# Altium footprint library PCB_IntegratedCircuit.PcbLib: 62 footprints (part 2 of 4)
Each footprint in its own frame and in the unit in brackets; x right, y up, seen from the top. Pads: shape width x height; smd on the part's side, far side on the other; paste and mask are expansions set on the pad; w line width, h text height; cw(c..) or ccw(c..) is an arc to the next point about the centre after c.
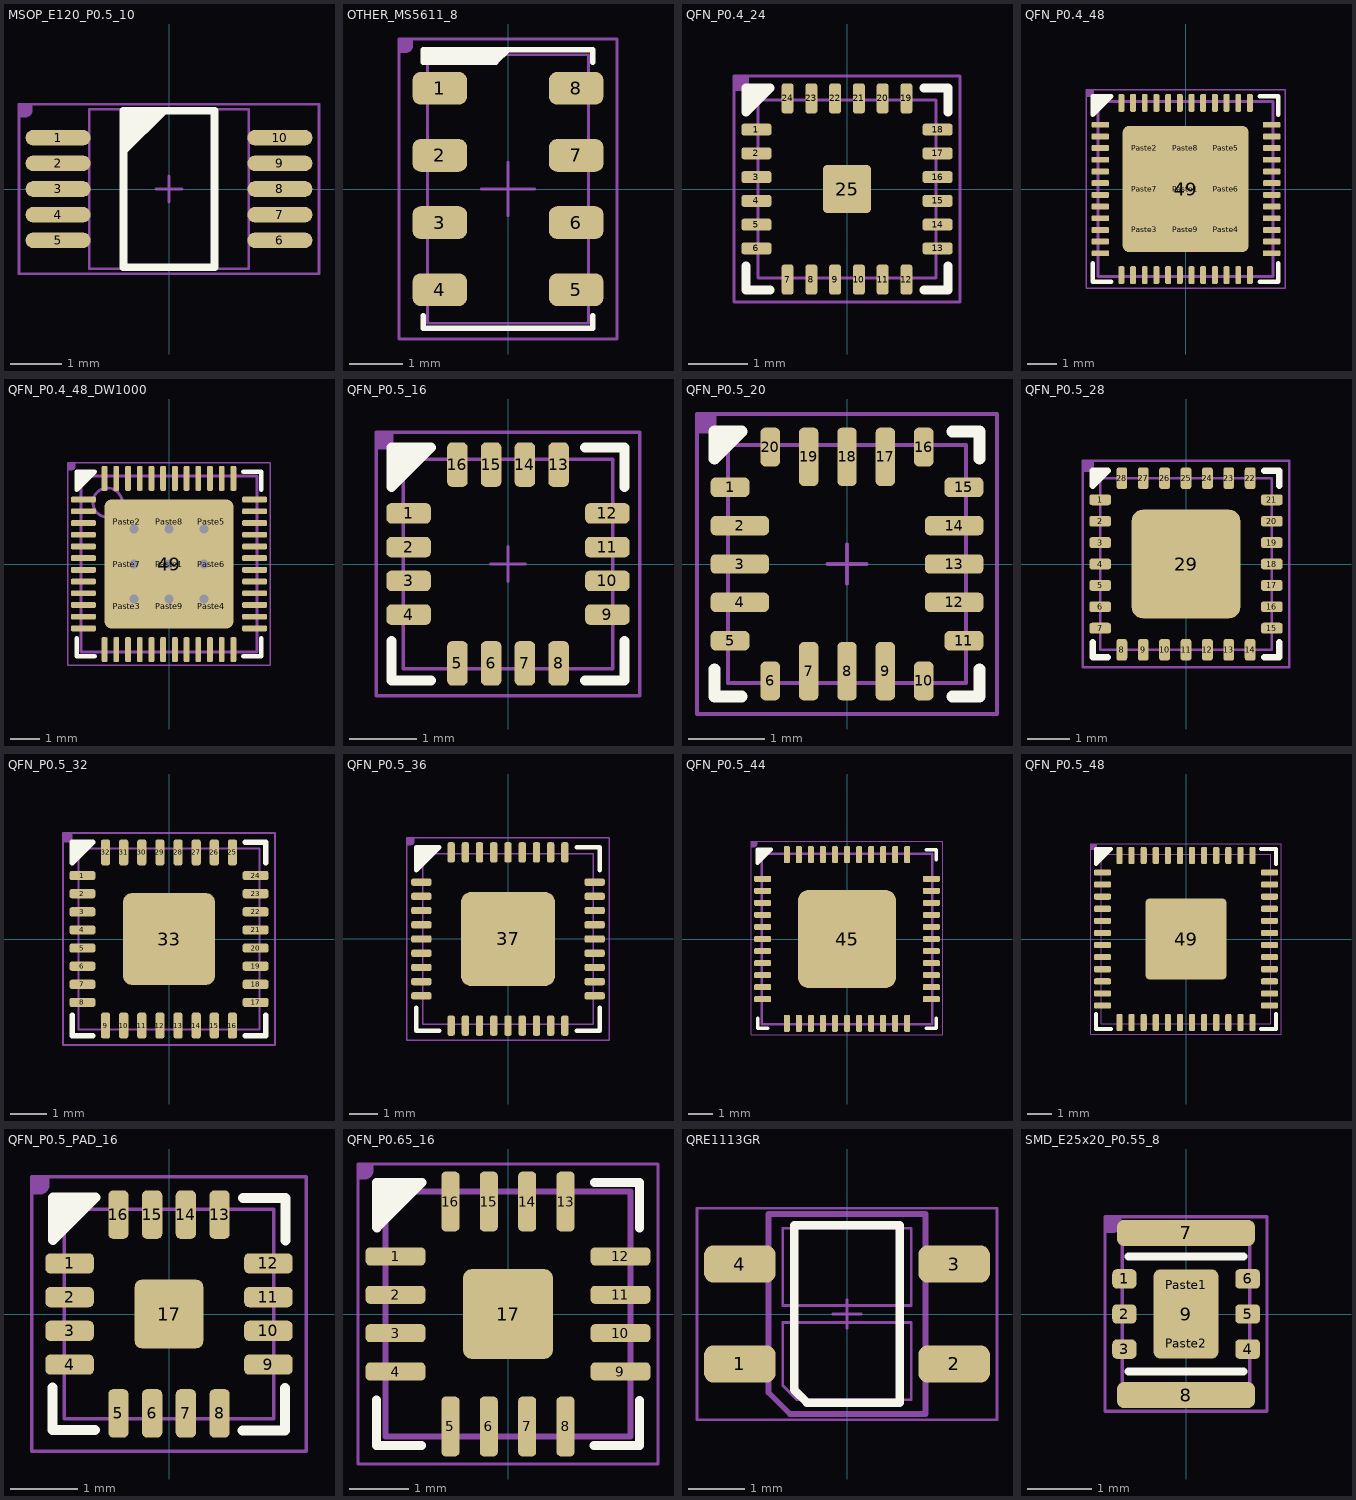
[diagram p1: the footprints below, top view; thin cyan lines are the x and y axes]

## MSOP_E120_P0.5_10 [mil]
height 43.31
pads (10):
  oval 50x12 smd: 1(-85,39.37) 2(-85,19.69) 3(-85,0) 4(-85,-19.68) 5(-85,-39.37) 6(85,-39.37) 7(85,-19.68) 8(85,0) 9(85,19.69) 10(85,39.37)
Top Overlay:
  region: -35,60 0,60 -35,25
  lines w6: -35,-60 -35,60 35,60 35,-60 -35,-60
Mechanical 13:
  lines w2: -10,0 10,0 ; 0,-10 0,10 ; -61.02,-61.02 61.02,-61.02 61.02,61.02 -61.02,61.02 -61.02,-61.02
T-Component:
  region: -115,65 -105,65 -105,60 -105,59.01 -105.76,57.17 -107.17,55.76 -109.01,55 -110,55 -115,55
  lines w2: -115,-65 115,-65 115,65 -115,65 -115,-65
  text ".Designator" at -41,-25 h100
3D body "User Library-msop-10.STEP": height 45.28, standoff 0, extent -96.45,-59.05 96.46,59.06

## OTHER_MS5611_8 [mil]
height 39.37
pads (8):
  rrect50% 40x24 smd: 1(-50,73.82) 2(-50,24.61) 3(-50,-24.61) 4(-50,-73.82) 5(50,-73.82) 6(50,-24.61) 7(50,24.61) 8(50,73.82)
Top Overlay:
  region: -62,102 0,102 -9,93 -62,93
  lines w4: -62,-93 -62,-102 62,-102 62,-93 ; 0,102 -9,93 -62,93 -62,102 62,102 62,93
Mechanical 13:
  lines w2: -19.68,0 19.68,0 ; 0,-19.68 0,19.68 ; -59.06,-98.43 -59.06,98.43 59.06,98.43 59.06,-98.43 -59.06,-98.43
T-Component:
  region: -80,110 -70,110 -70,105 -70,104.01 -70.76,102.17 -72.17,100.76 -74.01,100 -75,100 -80,100
  lines w2: -80,-110 80,-110 80,110 -80,110 -80,-110
  text ".Designator" at -41,-25 h100
3D body "User Library-CRYSTALSMD5X32.STEP": height 39.37, standoff 0, extent -62.99,-98.43 63,98.43

## QFN_P0.4_24 [mil]
height 39.37
pads (25):
  rrect50% 20x8 smd: 1(-60,39.37) 2(-60,23.62) 3(-60,7.87) 4(-60,-7.87) 5(-60,-23.62) 6(-60,-39.37) 13(60,-39.37) 14(60,-23.62) 15(60,-7.87) 16(60,7.87) 17(60,23.62) 18(60,39.37)
  rrect50% 8x20 smd: 7(-39.37,-60) 8(-23.62,-60) 9(-7.87,-60) 10(7.87,-60) 11(23.62,-60) 12(39.37,-60) 19(39.37,60) 20(23.62,60) 21(7.87,60) 22(-7.87,60) 23(-23.62,60) 24(-39.37,60)
  rrect20% 32x32 smd: 25(0,0)
Top Overlay:
  region: -67,67 -51,67 -67,51
  lines w6: -67,-51 -67,-67 -51,-67 ; 51,-67 67,-67 67,-51 ; 51,67 67,67 67,51 ; -67,51 -67,67 -51,67 -67,51
Top Solder:
  rectangle: -39.37,-70 39.37,-50
  region: 50,39.37 50,-39.37 70,-39.37 70,39.37
  rectangle: -39.37,50 39.37,70
  region: -70,39.37 -70,-39.37 -50,-39.37 -50,39.37
Mechanical 13:
  lines w2: -10,0 10,0 ; 0,-10 0,10 ; -59.05,-59.06 59.06,-59.06 59.06,59.06 -59.05,59.06 -59.05,-59.06
T-Component:
  region: -75,75 -65,75 -65,70 -65,69.01 -65.76,67.17 -67.17,65.76 -69.01,65 -70,65 -75,65
  lines w2: -75,-75 -75,75 75,75 75,-75 -75,-75
  text ".Designator" at -41,-25 h100
3D body "QFN40P300X300X100-24L.step": height 39.37, standoff 0, extent -59.84,-59.84 59.85,59.85

## QFN_P0.4_48 [mil]
height 35.43
pads (58):
  rrect50% 24x8 smd: 1(-115,86.61) 2(-115,70.87) 3(-115,55.12) 4(-115,39.37) 5(-115,23.62) 6(-115,7.87) 7(-115,-7.87) 8(-115,-23.62) 9(-115,-39.37) 10(-115,-55.12) 11(-115,-70.87) 12(-115,-86.61) 25(116,-86.61) 26(116,-70.87) 27(116,-55.12) 28(116,-39.37) 29(116,-23.62) 30(116,-7.87) 31(116,7.87) 32(116,23.62) 33(116,39.37) 34(116,55.12) 35(116,70.87) 36(116,86.61)
  rrect50% 8x24 smd: 13(-86.61,-116) 14(-70.87,-116) 15(-55.12,-116) 16(-39.37,-116) 17(-23.62,-116) 18(-7.87,-116) 19(7.87,-116) 20(23.62,-116) 21(39.37,-116) 22(55.12,-116) 23(70.87,-116) 24(86.61,-116) 37(86.61,116) 38(70.87,116) 39(55.12,116) 40(39.37,116) 41(23.62,116) 42(7.87,116) 43(-7.87,116) 44(-23.62,116) 45(-39.37,116) 46(-55.12,116) 47(-70.87,116) 48(-86.61,116)
  rrect10% 170x170 smd paste-173.23 mask+1.97: 49(0,0)
  rrect20% 50x50 on Top Paste mask+1.97: Paste1(0,0) Paste2(-55,55) Paste3(-55,-55) Paste4(55,-55) Paste5(55,55) Paste6(55,0) Paste7(-55,0) Paste8(0,55) Paste9(0,-55)
Top Overlay:
  region: -125,125 -125,100
  region: -125,100 -100,125 -125,125
  lines w6: -125,-100 -125,-125 -100,-125 ; 100,-125 125,-125 125,-100 ; 100,125 125,125 125,100 ; -125,100 -125,125 -100,125 -125,100
Top Solder:
  region: 104,86.61 104,-86.61 128,-86.61 128,86.61
  region: 86.61,-104 -86.61,-104 -86.61,-128 86.61,-128
  region: -103,-86.61 -103,86.61 -127,86.61 -127,-86.61
  rectangle: -86.61,104 86.61,128
Mechanical 13:
  lines w2: -10,0 10,0 ; 0,-10 0,10
  lines w3.94: -118,-118 -118,118 118,118 118,-118 -118,-118
T-Component:
  region: -134,134 -124,134 -124,129 -124,128.01 -124.76,126.17 -126.17,124.76 -128.01,124 -129,124 -134,124
  lines w2: -134,-134 -134,134 134,134 134,-134 -134,-134
  text ".Designator" at -45,-29.91 h100
3D body "QFN40P600X600X90_HS-49N.step": height 35.43, standoff -0.04, extent -118.15,-118.15 118.15,118.15

## QFN_P0.4_48_DW1000 [mm]
height 0.9
pads (58):
  rrect50% 0.85x0.2 smd mask+0.05: 1(-2.925,2.2) 2(-2.925,1.8) 3(-2.925,1.4) 4(-2.925,1) 5(-2.925,0.6) 6(-2.925,0.2) 7(-2.925,-0.2) 8(-2.925,-0.6) 9(-2.925,-1) 10(-2.925,-1.4) 11(-2.925,-1.8) 12(-2.925,-2.2) 25(2.925,-2.2) 26(2.925,-1.8) 27(2.925,-1.4) 28(2.925,-1) 29(2.925,-0.6) 30(2.925,-0.2) 31(2.925,0.2) 32(2.925,0.6) 33(2.925,1) 34(2.925,1.4) 35(2.925,1.8) 36(2.925,2.2)
  rrect50% 0.2x0.85 smd mask+0.05: 13(-2.2,-2.925) 14(-1.8,-2.925) 15(-1.4,-2.925) 16(-1,-2.925) 17(-0.6,-2.925) 18(-0.2,-2.925) 19(0.2,-2.925) 20(0.6,-2.925) 21(1,-2.925) 22(1.4,-2.925) 23(1.8,-2.925) 24(2.2,-2.925) 37(2.2,2.925) 38(1.8,2.925) 39(1.4,2.925) 40(1,2.925) 41(0.6,2.925) 42(0.2,2.925) 43(-0.2,2.925) 44(-0.6,2.925) 45(-1,2.925) 46(-1.4,2.925) 47(-1.8,2.925) 48(-2.2,2.925)
  rrect10% 4.4x4.4 smd paste-4.4 mask+0.05: 49(0,0)
  rrect20% 1.3x1.3 on Top Paste mask+0.05: Paste1(0,0) Paste2(-1.45,1.45) Paste3(-1.45,-1.45) Paste4(1.45,-1.45) Paste5(1.45,1.45) Paste6(1.45,0) Paste7(-1.45,0) Paste8(0,1.45) Paste9(0,-1.45)
via 1.2,0 diameter 0.6 hole 0.3
via 1.2,1.2 diameter 0.6 hole 0.3
via -1.2,1.2 diameter 0.6 hole 0.3
via 1.2,-1.2 diameter 0.6 hole 0.3
via 0,-1.2 diameter 0.6 hole 0.3
via -1.2,-1.2 diameter 0.6 hole 0.3
via -1.2,0 diameter 0.6 hole 0.3
via 0,0 diameter 0.6 hole 0.3
via 0,1.2 diameter 0.6 hole 0.3
Top Overlay:
  region: -3.15,3.15 -2.54,3.15 -3.15,2.54
  lines w0.152: -3.15,-2.54 -3.15,-3.15 -2.54,-3.15 ; 2.54,-3.15 3.15,-3.15 3.15,-2.54 ; 2.54,3.15 3.15,3.15 3.15,2.54 ; -3.15,2.54 -3.15,3.15 -2.54,3.15 -3.15,2.54
Top Solder:
  region: 2.2,-2.5 -2.2,-2.5 -2.2,-3.35 2.2,-3.35
  region: -2.5,-2.2 -2.5,2.2 -3.35,2.2 -3.35,-2.2
  rectangle: -2.2,2.5 2.2,3.35
  region: 2.5,2.2 2.5,-2.2 3.35,-2.2 3.35,2.2
Mechanical 13:
  circle w0.1: c-2.1,2.1 r0.5
  lines w0.051: -0.254,0 0.254,0 ; 0,-0.254 0,0.254
  lines w0.1: -3,-3 3,-3 3,3 -3,3 -3,-3
T-Component:
  region: -3.454,3.454 -3.2,3.454 -3.2,3.327 -3.2,3.302 -3.22,3.255 -3.255,3.22 -3.302,3.2 -3.327,3.2 -3.454,3.2
  lines w0.051: -3.454,-3.454 -3.454,3.454 3.454,3.454 3.454,-3.454 -3.454,-3.454
  text ".Designator" at -1.041,-0.635 h2.54
3D body "QFN40P600X600X90_HS-49L.step": height 0.9, standoff 0, extent -3.001,-3.001 3.001,3.001

## QFN_P0.5_16 [mil]
height 23.62
pads (16):
  rrect50% 26x12 smd: 1(-58,29.53) 2(-58,9.84) 3(-58,-9.84) 4(-58,-29.53) 9(58,-29.53) 10(58,-9.84) 11(58,9.84) 12(58,29.53)
  rrect50% 12x26 smd: 5(-29.53,-58) 6(-9.84,-58) 7(9.84,-58) 8(29.53,-58) 13(29.53,58) 14(9.84,58) 15(-9.84,58) 16(-29.53,58)
Top Overlay:
  region: -68,45 -68,68 -45,68
  lines w6: -68,-45 -68,-68 -45,-68 ; 45,-68 68,-68 68,-45 ; 45,68 68,68 68,45 ; -68,45 -45,68 -68,68 -68,45
Top Solder:
  region: 71,29.53 45,29.53 45,-29.53 71,-29.53
  region: -29.53,71 -29.53,45 29.53,45 29.53,71
  rectangle: -71,-29.53 -45,29.53
  region: 29.53,-71 29.53,-45 -29.53,-45 -29.53,-71
Mechanical 13:
  lines w2: -10,0 10,0 ; 0,-10 0,10 ; -61.02,-61.02 61.02,-61.02 61.02,61.02 -61.02,61.02 -61.02,-61.02
T-Component:
  region: -77,77 -67,77 -67,72 -67,71.01 -67.76,69.17 -69.17,67.76 -71.01,67 -72,67 -77,67
  lines w2: -77,-77 -77,77 77,77 77,-77 -77,-77
  text ".Designator" at -41,-25 h100
3D body "QFN50P300X300X100-16N.step": height 39.37, standoff 0, extent -59.05,-59.05 59.06,59.06

## QFN_P0.5_20 [mil] "QFN, 20-Leads, Body 3.00x3.00mm, Pitch 0.50mm, IPC High Density"
height 23.62
pads (20):
  rrect50% 20x10 smd: 1(-60,39.37) 5(-60,-39.37) 11(60,-39.37) 15(60,39.37)
  rrect50% 30x10 smd: 2(-55,19.69) 3(-55,0) 4(-55,-19.68) 12(55,-19.68) 13(55,0) 14(55,19.69)
  rrect50% 10x20 smd: 6(-39.37,-60) 10(39.37,-60) 16(39.37,60) 20(-39.37,60)
  rrect50% 10x30 smd: 7(-19.69,-55) 8(0,-55) 9(19.68,-55) 17(19.68,55) 18(0,55) 19(-19.69,55)
Top Layer:
  region: -39.37,-60
Top Overlay:
  region: -68,54 -68,68 -54,68
  lines w6: -68,-54 -68,-68 -54,-68 ; 54,-68 68,-68 68,-54 ; 54,68 68,68 68,54 ; -68,54 -54,68 -68,68 -68,54
Top Solder:
  rectangle: -70,-19.68 -40,19.69
  rectangle: 40,-19.68 70,19.69
  region: -19.69,70 -19.69,40 19.69,40 19.69,70
  region: -19.68,-40 -19.69,-70 19.68,-70 19.69,-40
  region: -19.69,-50 -39.37,-50 -39.37,-70 -19.69,-70
  region: -70,-19.69 -70,-39.37 -50,-39.37 -50,-19.68
  region: 19.69,50 39.37,50 39.37,70 19.68,70
  region: 70,19.69 70,39.37 50,39.37 50,19.69
  region: -19.69,70 -39.37,70 -39.37,50 -19.69,50
  region: 19.69,-70 39.37,-70 39.37,-50 19.68,-50
  region: -50,19.69 -50,39.37 -70,39.37 -70,19.69
  region: 50,-19.69 50,-39.37 70,-39.37 70,-19.68
Mechanical 13:
  lines w2: -10,0 10,0 ; 0,-10 0,10 ; -61.02,-61.02 61.02,-61.02 61.02,61.02 -61.02,61.02 -61.02,-61.02
T-Component:
  region: -77,77 -67,77 -67,72 -67,71.01 -67.76,69.17 -69.17,67.76 -71.01,67 -72,67 -77,67
  lines w2: -77,-77 -77,77 77,77 77,-77 -77,-77
  text ".Designator" at -41,-25 h100
3D body "QFN50P300X300X60-20L.step": height 23.62, standoff 0, extent -61.06,-61.06 61.06,61.06

## QFN_P0.5_28 [mil]
height 23.62
pads (29):
  rrect50% 20x10 smd: 1(-79,59.06) 2(-79,39.37) 3(-79,19.68) 4(-79,0) 5(-79,-19.68) 6(-79,-39.37) 7(-79,-59.06) 15(79,-59.06) 16(79,-39.37) 17(79,-19.68) 18(79,0) 19(79,19.68) 20(79,39.37) 21(79,59.06)
  rrect50% 10x20 smd: 8(-59.06,-79) 9(-39.37,-79) 10(-19.68,-79) 11(0,-79) 12(19.68,-79) 13(39.37,-79) 14(59.06,-79) 22(59.06,79) 23(39.37,79) 24(19.68,79) 25(0,79) 26(-19.68,79) 27(-39.37,79)
  rrect50% 9.84x20 smd: 28(-59.06,79)
  rrect20% 100x100 smd: 29(0,0)
Top Overlay:
  region: -86,72 -72,86 -86,86
  lines w6: -86,-72 -86,-86 -72,-86 ; 72,-86 86,-86 86,-72 ; 72,86 86,86 86,72 ; -86,72 -86,86 -72,86 -86,72
Top Solder:
  region: -59.06,89 -59.06,69 59.06,69 59.06,89
  region: 89,59.06 69,59.06 69,-59.05 89,-59.05
  region: 59.06,-89 59.06,-69 -59.06,-69 -59.06,-89
  rectangle: -89,-59.06 -69,59.06
Mechanical 13:
  lines w2: -10,0 10,0 ; 0,-10 0,10 ; -79,-79 79,-79 79,79 -79,79 -79,-79
T-Component:
  region: -95,95 -85,95 -85,90 -85,89.01 -85.76,87.17 -87.17,85.76 -89.01,85 -90,85 -95,85
  lines w2: -95,-95 -95,95 95,95 95,-95 -95,-95
  text ".Designator" at -41,-25 h100
3D body "QFN50P400X400X55-28L.step": height 21.65, standoff 0, extent -78.78,-78.78 78.78,78.78

## QFN_P0.5_32 [mil]
height 39.37
pads (33):
  rrect50% 28x10 smd: 1(-94,68.9) 2(-94,49.21) 3(-94,29.53) 4(-94,9.84) 5(-94,-9.84) 6(-94,-29.53) 7(-94,-49.21) 8(-94,-68.9) 17(94,-68.9) 18(94,-49.21) 19(94,-29.53) 20(94,-9.84) 21(94,9.84) 22(94,29.53) 23(94,49.21) 24(94,68.9)
  rrect50% 10x28 smd: 9(-68.9,-94) 10(-49.21,-94) 11(-29.53,-94) 12(-9.84,-94) 13(9.84,-94) 14(29.53,-94) 15(49.21,-94) 16(68.9,-94) 25(68.9,94) 26(49.21,94) 27(29.53,94) 28(9.84,94) 29(-9.84,94) 30(-29.53,94) 31(-49.21,94) 32(-68.9,94)
  rrect20% 100x100 smd: 33(0,0)
Top Overlay:
  region: -83,105 -105,105 -105,83
  lines w6: -105,-83 -105,-105 -83,-105 ; 83,-105 105,-105 105,-83 ; 83,105 105,105 105,83 ; -105,83 -105,105 -83,105 -105,83
Top Solder:
  region: 68.9,80 68.9,108 -68.9,108 -68.9,80
  region: 68.9,-108 68.9,-80 -68.9,-80 -68.9,-108
  region: -80,68.9 -108,68.9 -108,-68.9 -80,-68.9
  region: 108,68.9 80,68.9 80,-68.9 108,-68.9
Mechanical 13:
  lines w2: -10,0 10,0 ; 0,-10 0,10 ; -98.42,-98.42 -98.42,98.43 98.43,98.43 98.43,-98.42 -98.42,-98.42
T-Component:
  region: -115,115 -105,115 -105,110 -105,109.01 -105.76,107.17 -107.17,105.76 -109.01,105 -110,105 -115,105
  lines w2: -115,-115 -115,115 115,115 115,-115 -115,-115
  text ".Designator" at -41,-25 h100
3D body "QFN50P500X500X55-32L.step": height 21.65, standoff 0, extent -99.21,-99.21 99.22,99.22

## QFN_P0.5_36 [mil]
height 39.37
pads (37):
  rrect50% 28x10 smd: 1(-120,78.74) 2(-120,59.06) 3(-120,39.37) 4(-120,19.69) 5(-120,0) 6(-120,-19.68) 7(-120,-39.37) 8(-120,-59.05) 9(-120,-78.74) 19(120,-78.74) 20(120,-59.05) 21(120,-39.37) 22(120,-19.68) 23(120,0) 24(120,19.68) 25(120,39.37) 26(120,59.06) 27(120,78.74)
  rrect50% 10x28 smd: 10(-78.74,-120) 11(-59.06,-120) 12(-39.37,-120) 13(-19.69,-120) 14(0,-120) 15(19.68,-120) 16(39.37,-120) 17(59.05,-120) 18(78.74,-120) 28(78.74,120) 29(59.05,120) 30(39.37,120) 31(19.68,120) 32(0,120) 33(-19.69,120) 34(-39.37,120) 35(-59.06,120) 36(-78.74,120)
  rrect20% 130x130 smd: 37(0,0)
Top Overlay:
  region: -127,127 -95,127 -127,95
  lines w6: -127,-95 -127,-127 -95,-127 ; 95,-127 127,-127 127,-95 ; 95,127 127,127 127,95 ; -127,95 -127,127 -95,127 -127,95
Top Solder:
  region: 87.74,106 87.74,134 -87.74,134 -87.74,106
  region: 87.74,-134 87.74,-106 -87.74,-106 -87.74,-134
  rectangle: 106,-87.74 134,87.74
  rectangle: -134,-87.74 -106,87.74
Mechanical 13:
  lines w2: -10,0 10,0 ; 0,-10 0,10 ; -118.11,-118.11 118.11,-118.11 118.11,118.11 -118.11,118.11 -118.11,-118.11
T-Component:
  region: -140,140 -130,140 -130,135 -130,134.01 -130.76,132.17 -132.17,130.76 -134.01,130 -135,130 -140,130
  lines w2: -140,-140 -140,140 140,140 140,-140 -140,-140
  text ".Designator" at -41,-25 h100
3D body "QFN50P600X600X90-36L.step": height 35.43, standoff 0, extent -118.89,-118.89 118.9,118.9

## QFN_P0.5_44 [mil]
height 39.37
pads (45):
  rrect50% 28x10 smd: 1(-138,98.43) 2(-138,78.74) 3(-138,59.06) 4(-138,39.37) 5(-138,19.68) 6(-138,0) 7(-138,-19.69) 8(-138,-39.37) 9(-138,-59.06) 10(-138,-78.74) 11(-138,-98.43) 23(138,-98.43) 24(138,-78.74) 25(138,-59.05) 26(138,-39.37) 27(138,-19.68) 28(138,0) 29(138,19.69) 30(138,39.37) 31(138,59.06) 32(138,78.74) 33(138,98.43)
  rrect50% 10x28 smd: 12(-98.43,-138) 13(-78.74,-138) 14(-59.06,-138) 15(-39.37,-138) 16(-19.69,-138) 17(0,-138) 18(19.68,-138) 19(39.37,-138) 20(59.06,-138) 21(78.74,-138) 22(98.43,-138) 34(98.43,138) 35(78.74,138) 36(59.06,138) 37(39.37,138) 38(19.68,138) 39(0,138) 40(-19.69,138) 41(-39.37,138) 42(-59.06,138) 43(-78.74,138) 44(-98.43,138)
  rrect20% 160x160 smd: 45(0,0)
Top Overlay:
  region: -124.34,146.34 -146.34,146.34 -146.34,124.34
  lines w6: -145.76,-129.76 -145.76,-145.76 -129.76,-145.76 ; 129.76,-145.76 145.76,-145.76 145.76,-129.76 ; 129.76,145.76 145.76,145.76 145.76,129.76 ; -146.34,124.34 -146.34,146.34 -124.34,146.34 -146.34,124.34
Top Solder:
  region: 107.43,-152 107.43,-124 -107.43,-124 -107.43,-152
  region: 107.43,124 107.43,152 -107.43,152 -107.43,124
  rectangle: 124,-107.43 152,107.43
  rectangle: -152,-107.43 -124,107.43
Mechanical 13:
  lines w2: -10,0 10,0 ; 0,-10 0,10
  lines w4: -139.76,-139.76 -139.76,139.76 139.76,139.76 139.76,-139.76 -139.76,-139.76
T-Component:
  region: -157,160 -147,160 -147,155 -147,154.01 -147.76,152.17 -149.17,150.76 -151.01,150 -152,150 -157,150
  lines w2: -157,-157 157,-157 157,160 -157,160 -157,-157
  text ".Designator" at -41,-25 h100
3D body "User Library-smd_qfn-44-2.STEP": height 35.43, standoff 0, extent -137.82,-137.83 137.84,137.84

## QFN_P0.5_48 [mil]
height 21.65
pads (49):
  rrect50% 28x10 smd: 1(-136,108.27) 2(-136,88.58) 3(-136,68.9) 4(-136,49.21) 5(-136,29.53) 6(-136,9.84) 7(-136,-9.84) 8(-136,-29.53) 9(-136,-49.21) 10(-136,-68.9) 11(-136,-88.58) 12(-136,-108.27) 25(136,-108.27) 26(136,-88.58) 27(136,-68.9) 28(136,-49.21) 29(136,-29.53) 30(136,-9.84) 31(136,9.84) 32(136,29.53) 33(136,49.21) 34(136,68.9) 35(136,88.58) 36(136,108.27)
  rrect50% 10x28 smd: 13(-108.27,-136) 14(-88.58,-136) 15(-68.9,-136) 16(-49.21,-136) 17(-29.53,-136) 18(-9.84,-136) 19(9.84,-136) 20(29.53,-136) 21(49.21,-136) 22(68.9,-136) 23(88.58,-136) 24(108.27,-136) 37(108.27,136) 38(88.58,136) 39(68.9,136) 40(49.21,136) 41(29.53,136) 42(9.84,136) 43(-9.84,136) 44(-29.53,136) 45(-49.21,136) 46(-68.9,136) 47(-88.58,136) 48(-108.27,136)
  rrect10% 132x132 smd: 49(0,0)
Top Overlay:
  region: -146.67,146.67 -122,146.67 -146.67,122
  lines w6: -146.67,-122 -146.67,-146.67 -122,-146.67 ; 122,-146.67 146.67,-146.67 146.67,-122 ; 122,146.67 146.67,146.67 146.67,122 ; -146.67,122 -122,146.67 -146.67,146.67 -146.67,122
Top Solder:
  rectangle: -150,-108.27 -122,108.27
  region: 108.27,-150 108.27,-122 -108.27,-122 -108.27,-150
  region: 150,108.27 122,108.27 122,-108.27 150,-108.27
  region: -108.27,150 -108.27,122 108.27,122 108.27,150
Mechanical 13:
  lines w2: -10,0 10,0 ; 0,-10 0,10 ; -137.79,-137.8 -137.79,137.8 137.8,137.8 137.8,-137.8 -137.79,-137.8
T-Component:
  region: -155,155 -145,155 -145,150 -145,149.01 -145.76,147.17 -147.17,145.76 -149.01,145 -150,145 -155,145
  lines w2: -155,-155 155,-155 155,155 -155,155 -155,-155
  text ".Designator" at -41,-25 h100
3D body "QFN50P700X700X55-48L.step": height 21.65, standoff 0, extent -138.58,-138.58 138.58,138.59

## QFN_P0.5_PAD_16 [mm]
height 0.6
pads (17):
  rrect50% 0.72x0.3 smd: 1(-1.473,0.75) 2(-1.473,0.25) 3(-1.473,-0.25) 4(-1.473,-0.75) 9(1.473,-0.75) 10(1.473,-0.25) 11(1.473,0.25) 12(1.473,0.75)
  rrect50% 0.3x0.72 smd: 5(-0.75,-1.473) 6(-0.25,-1.473) 7(0.25,-1.473) 8(0.75,-1.473) 13(0.75,1.473) 14(0.25,1.473) 15(-0.25,1.473) 16(-0.75,1.473)
  rrect20% 1.016x1.016 smd: 17(0,0)
Top Overlay:
  region: -1.719,1.727 -1.092,1.727 -1.719,1.101
  lines w0.152: -1.727,-1.092 -1.727,-1.719 -1.101,-1.719 ; 1.092,-1.727 1.719,-1.727 1.719,-1.101 ; 1.101,1.719 1.727,1.719 1.727,1.092 ; -1.719,1.101 -1.719,1.727 -1.092,1.727 -1.719,1.101
Top Solder:
  rectangle: -1.829,-0.75 -1.118,0.75
  region: 0.75,-1.829 0.75,-1.118 -0.75,-1.118 -0.75,-1.829
  region: -0.75,1.829 -0.75,1.118 0.75,1.118 0.75,1.829
  region: 1.829,0.75 1.118,0.75 1.118,-0.75 1.829,-0.75
Mechanical 13:
  lines w0.051: -0.254,0 0.254,0 ; 0,-0.254 0,0.254 ; -1.55,-1.55 1.55,-1.55 1.55,1.55 -1.55,1.55 -1.55,-1.55
T-Component:
  region: -2.032,2.032 -1.778,2.032 -1.778,1.905 -1.778,1.88 -1.797,1.833 -1.833,1.797 -1.88,1.778 -1.905,1.778 -2.032,1.778
  lines w0.051: -2.032,-2.032 -2.032,2.032 2.032,2.032 2.032,-2.032 -2.032,-2.032
  text ".Designator" at -1.041,-0.635 h2.54
3D body "QFN50P300X300X100-16N.step": height 1, standoff 0, extent -1.5,-1.5 1.5,1.5

## QFN_P0.65_16 [mil]
height 59.06
pads (17):
  rrect50% 40x12 smd: 1(-75,38.39) 2(-75,12.8) 3(-75,-12.8) 4(-75,-38.39) 9(75,-38.39) 10(75,-12.8) 11(75,12.8) 12(75,38.39)
  rrect50% 12x40 smd: 5(-38.39,-75) 6(-12.8,-75) 7(12.8,-75) 8(38.39,-75) 13(38.39,75) 14(12.8,75) 15(-12.8,75) 16(-38.39,75)
  rrect20% 60x60 smd: 17(0,0)
Top Overlay:
  region: -87.69,87.69 -57.51,87.69 -87.69,57.5
  lines w6: -87.6,-57.4 -87.6,-87.6 -57.6,-87.6 ; -87.6,57.6 -87.6,87.6 -57.4,87.6 -87.5,57.5 ; 57.4,-87.6 87.6,-87.6 87.6,-57.6 ; 57.6,87.6 87.6,87.6 87.6,57.4
Mechanical 13:
  lines w2: -10,0 10,0 ; 0,-10 0,10
  lines w3.94: -81.69,-81.69 -81.69,81.69 81.69,81.69 81.69,-81.69 -81.69,-81.69
T-Component:
  region: -100,100 -90,100 -90,95 -90,94.01 -90.76,92.17 -92.17,90.76 -94.01,90 -95,90 -100,90
  lines w2: -100,-100 -100,100 100,100 100,-100 -100,-100
  text ".Designator" at -41,-25 h100
3D body "User Library-qfn16-4x4with pad.STEP": height 36.22, standoff 0, extent -78.73,-78.73 78.75,78.75

## QRE1113GR [mil]
height 66.93
pads (4):
  rrect50% 50x26 smd: 1(-75,-35) 2(75,-35) 3(75,35) 4(-75,35)
Top Overlay:
  lines w6: -37,-53 -37,62 37,62 37,-62 -28,-62 -37,-53
Mechanical 13:
  lines w2: -10,0 10,0 ; 0,-10 0,10 ; -45,-50 -45,-6 45,-6 45,-60 -35,-60 -45,-50 ; -45,6 -45,60 45,60 45,6 -45,6
  lines w4: -55,-55 -55,70 55,70 55,-70 -40,-70 -55,-55
T-Component:
  lines w1.97: -105,-74 -105,74 105,74 105,-74 -105,-74
  text ".Designator" at -41,-25 h100

## SMD_E25x20_P0.55_8 [mil]
pads (11):
  rrect50% 15x12 smd mask+0: 1(-38,21.65) 2(-38,0) 3(-38,-21.65)
  rrect40% 15x12 smd mask+0: 4(38,-21.65) 5(38,0) 6(38,21.65)
  rrect50% 85x16 smd paste+0 mask+0: 7(0,50)
  rrect50% 85x16 smd mask+0: 8(0,-50)
  rrect20% 40x55 smd paste-55 mask+0: 9(0,0)
  rrect20% 36x16 on Top Paste mask+1.97: Paste1(0,18) Paste2(0,-18)
Top Overlay:
  lines w5: -35.43,-35.43 35.43,-35.43 ; -35.43,35.43 35.43,35.43
Mechanical 13:
  lines w2: -10,0 10,0 ; 0,-10 0,10 ; -39.37,-49.21 -39.37,49.21 39.37,49.21 39.37,-49.21 -39.37,-49.21
T-Component:
  region: -50,60 -40,60 -40,55 -40,54.01 -40.76,52.17 -42.17,50.76 -44.01,50 -45,50 -50,50
  lines w2: -50,-60 50,-60 50,60 -50,60 -50,-60
  text ".Designator" at -25,-15 h60
3D body "User Library-Osc KC2520.STEP": height 31.1, standoff 0, extent -39.36,-49.22 39.37,49.21